# EAGLE library part IC_MCP4018 (library dp_devices.v6)
7-Bit single I2C digital potentiometer with volatile memory
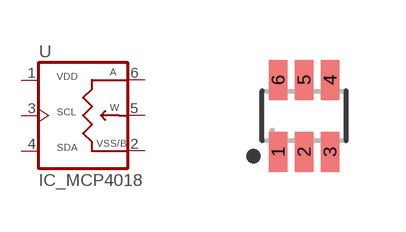
[diagram p214: symbol with the pads of SC-70-6; footprint SC-70-6]

Designator prefix U

## IC_MCP4018  [SC-70-6]
1  VDD  sup
2  VSS/B  sup
3  SCL  in
4  SDA
5  W
6  A

## Footprint SC-70-6 (pad centres in mm)
smd 0.47 x 1: 1 -0.65,-0.9; 2 0,-0.9; 3 0.65,-0.9; 4 0.65,0.9; 5 0,0.9; 6 -0.65,0.9